# Altium footprint library Sierrathon.PcbLib: 12 footprints
Each footprint in its own frame and in the unit in brackets; x right, y up, seen from the top. Pads: shape width x height; smd on the part's side, far side on the other; paste and mask are expansions set on the pad; w line width, h text height; cw(c..) or ccw(c..) is an arc to the next point about the centre after c.
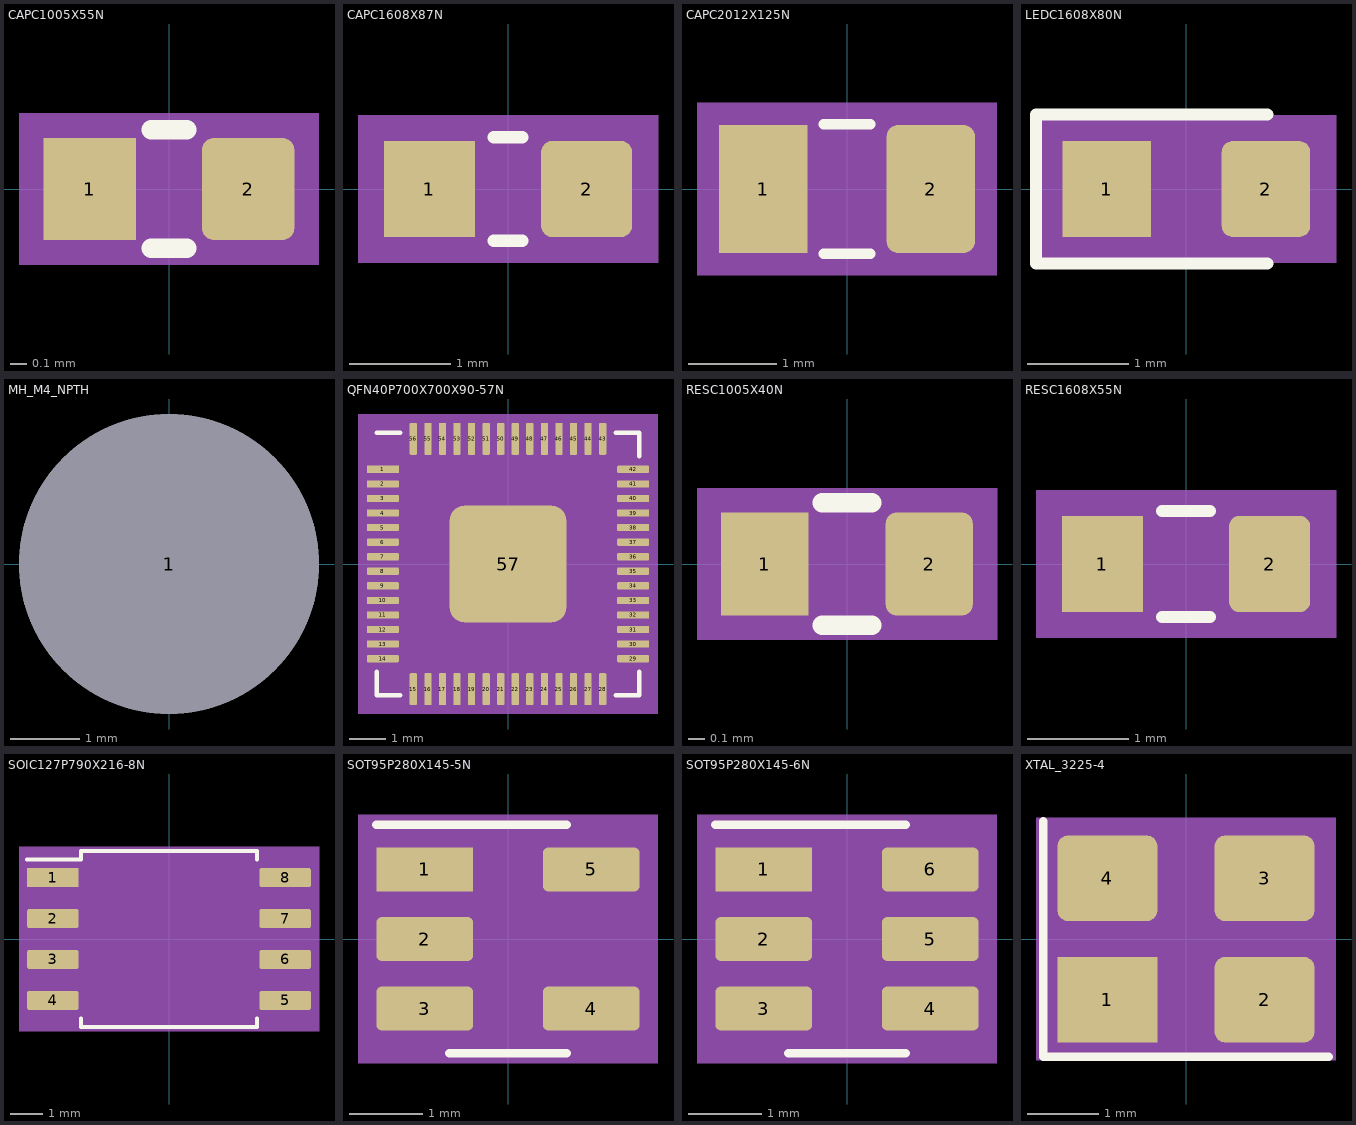
[diagram p0: the footprints below, top view; thin cyan lines are the x and y axes]

## CAPC1005X55N [mm] "Chip capacitor 0402 (1005 metric), IPC-7351B nominal"
pads (2):
  rect 0.56x0.62 smd: 1(-0.48,0)
  rrect25% 0.56x0.62 smd: 2(0.48,0)
Top Overlay:
  lines w0.12: -0.108,-0.36 0.108,-0.36 ; -0.108,0.36 0.108,0.36
  text ".Designator" at 0,0.91 h1
Top Assembly:
  lines w0.1: -0.5,-0.25 -0.5,0.25 0.5,0.25 0.5,-0.25 -0.5,-0.25
Top Courtyard:
  region: -0.91,-0.46 0.91,-0.46 0.91,0.46 -0.91,0.46

## CAPC1608X87N [mm] "Chip capacitor 0603 (1608 metric), IPC-7351B nominal"
pads (2):
  rect 0.9x0.95 smd: 1(-0.775,0)
  rrect25% 0.9x0.95 smd: 2(0.775,0)
Top Overlay:
  lines w0.12: -0.141,-0.51 0.141,-0.51 ; -0.141,0.51 0.141,0.51
  text ".Designator" at 0,1.075 h1
Top Assembly:
  lines w0.1: -0.8,-0.4 -0.8,0.4 0.8,0.4 0.8,-0.4 -0.8,-0.4
Top Courtyard:
  region: -1.48,-0.73 1.48,-0.73 1.48,0.73 -1.48,0.73

## CAPC2012X125N [mm] "Chip capacitor 0805 (2012 metric), IPC-7351B nominal"
pads (2):
  rect 1x1.45 smd: 1(-0.95,0)
  rrect25% 1x1.45 smd: 2(0.95,0)
Top Overlay:
  lines w0.12: -0.261,-0.735 0.261,-0.735 ; -0.261,0.735 0.261,0.735
  text ".Designator" at 0,1.325 h1
Top Assembly:
  lines w0.1: -1,-0.625 -1,0.625 1,0.625 1,-0.625 -1,-0.625
Top Courtyard:
  region: -1.7,-0.98 1.7,-0.98 1.7,0.98 -1.7,0.98

## LEDC1608X80N [mm] "Chip LED 0603 (1608 metric). Pad 1 = cathode"
pads (2):
  rect 0.875x0.95 smd: 1(-0.787,0)
  rrect25% 0.875x0.95 smd: 2(0.787,0)
Top Overlay:
  lines w0.12: 0.8,-0.735 -1.485,-0.735 -1.485,0.735 0.8,0.735
  text ".Designator" at 0,1.075 h1
Top Assembly:
  lines w0.1: -0.8,-0.4 -0.8,0.1 -0.5,0.4 0.8,0.4 0.8,-0.4 -0.8,-0.4
Top Courtyard:
  region: -1.48,-0.73 1.48,-0.73 1.48,0.73 -1.48,0.73

## MH_M4_NPTH [mm] "M4 mounting hole, 4.3 mm NPTH"
pads (1):
  round 4.3 hole 4.3 unplated: 1(0,0)
Top Overlay:
  text ".Designator" at 0,2.75 h1

## QFN40P700X700X90-57N [mm] "QFN-56 7x7 mm 0.4 mm pitch, EP 3.2 x 3.2 mm (RP2040)"
pads (57):
  rect 0.875x0.2 smd: 1(-3.437,2.6)
  rrect25% 0.875x0.2 smd: 2(-3.437,2.2) 3(-3.437,1.8) 4(-3.437,1.4) 5(-3.437,1) 6(-3.437,0.6) 7(-3.437,0.2) 8(-3.437,-0.2) 9(-3.437,-0.6) 10(-3.437,-1) 11(-3.437,-1.4) 12(-3.437,-1.8) 13(-3.437,-2.2) 14(-3.437,-2.6) 29(3.437,-2.6) 30(3.437,-2.2) 31(3.437,-1.8) 32(3.437,-1.4) 33(3.437,-1) 34(3.437,-0.6) 35(3.437,-0.2) 36(3.437,0.2) 37(3.437,0.6) 38(3.437,1) 39(3.437,1.4) 40(3.437,1.8) 41(3.437,2.2) 42(3.437,2.6)
  rrect25% 0.2x0.875 smd: 15(-2.6,-3.437) 16(-2.2,-3.437) 17(-1.8,-3.437) 18(-1.4,-3.437) 19(-1,-3.437) 20(-0.6,-3.437) 21(-0.2,-3.437) 22(0.2,-3.437) 23(0.6,-3.437) 24(1,-3.437) 25(1.4,-3.437) 26(1.8,-3.437) 27(2.2,-3.437) 28(2.6,-3.437) 43(2.6,3.437) 44(2.2,3.437) 45(1.8,3.437) 46(1.4,3.437) 47(1,3.437) 48(0.6,3.437) 49(0.2,3.437) 50(-0.2,3.437) 51(-0.6,3.437) 52(-1,3.437) 53(-1.4,3.437) 54(-1.8,3.437) 55(-2.2,3.437) 56(-2.6,3.437)
  rrect25% 3.2x3.2 smd: 57(0,0)
Top Overlay:
  lines w0.12: -3.61,-2.96 -3.61,-3.61 -2.96,-3.61 ; -3.61,3.61 -2.96,3.61 ; 2.96,-3.61 3.61,-3.61 3.61,-2.96 ; 2.96,3.61 3.61,3.61 3.61,2.96
  text ".Designator" at 0,4.475 h1
Top Assembly:
  lines w0.1: -3.5,-3.5 3.5,-3.5 3.5,3.5 -2.5,3.5 -3.5,2.5 -3.5,-3.5
Top Courtyard:
  region: -4.12,-4.12 4.12,-4.12 4.12,4.12 -4.12,4.12

## RESC1005X40N [mm] "Chip resistor 0402 (1005 metric), IPC-7351B nominal"
pads (2):
  rect 0.54x0.64 smd: 1(-0.51,0)
  rrect25% 0.54x0.64 smd: 2(0.51,0)
Top Overlay:
  lines w0.12: -0.154,-0.38 0.154,-0.38 ; -0.154,0.38 0.154,0.38
  text ".Designator" at 0,0.92 h1
Top Assembly:
  lines w0.1: -0.525,-0.27 -0.525,0.27 0.525,0.27 0.525,-0.27 -0.525,-0.27
Top Courtyard:
  region: -0.93,-0.47 0.93,-0.47 0.93,0.47 -0.93,0.47

## RESC1608X55N [mm] "Chip resistor 0603 (1608 metric), IPC-7351B nominal"
pads (2):
  rect 0.8x0.95 smd: 1(-0.825,0)
  rrect25% 0.8x0.95 smd: 2(0.825,0)
Top Overlay:
  lines w0.12: -0.237,-0.523 0.237,-0.523 ; -0.237,0.523 0.237,0.523
  text ".Designator" at 0,1.075 h1
Top Assembly:
  lines w0.1: -0.8,-0.413 -0.8,0.413 0.8,0.413 0.8,-0.413 -0.8,-0.413
Top Courtyard:
  region: -1.48,-0.73 1.48,-0.73 1.48,0.73 -1.48,0.73

## SOIC127P790X216-8N [mm] "SOIC-8 208 mil (5.23 x 5.23 mm body), 1.27 mm pitch"
pads (8):
  rect 1.6x0.6 smd: 1(-3.6,1.905)
  rrect25% 1.6x0.6 smd: 2(-3.6,0.635) 3(-3.6,-0.635) 4(-3.6,-1.905) 5(3.6,-1.905) 6(3.6,-0.635) 7(3.6,0.635) 8(3.6,1.905)
Top Overlay:
  lines w0.12: -4.4,2.465 -2.725,2.465 -2.725,2.725 0,2.725 2.725,2.725 2.725,2.465 ; -2.725,-2.465 -2.725,-2.725 0,-2.725 2.725,-2.725 2.725,-2.465
  text ".Designator" at 0,2.805 h1
Top Assembly:
  lines w0.1: -2.615,-2.615 2.615,-2.615 2.615,2.615 -1.615,2.615 -2.615,1.615 -2.615,-2.615
Top Courtyard:
  region: -4.65,-2.86 4.65,-2.86 4.65,2.86 -4.65,2.86

## SOT95P280X145-5N [mm] "SOT-23-5 (SOT-25), 0.95 mm pitch"
pads (5):
  rect 1.325x0.6 smd: 1(-1.138,0.95)
  rrect25% 1.325x0.6 smd: 2(-1.138,0) 3(-1.138,-0.95) 4(1.138,-0.95) 5(1.138,0.95)
Top Overlay:
  lines w0.12: -1.8,1.56 0,1.56 0.8,1.56 ; -0.8,-1.56 0,-1.56 0.8,-1.56
  text ".Designator" at 0,1.85 h1
Top Assembly:
  lines w0.1: -0.8,-1.45 0.8,-1.45 0.8,1.45 -0.4,1.45 -0.8,1.05 -0.8,-1.45
Top Courtyard:
  region: -2.05,-1.7 2.05,-1.7 2.05,1.7 -2.05,1.7

## SOT95P280X145-6N [mm] "SOT-23-6, 0.95 mm pitch"
pads (6):
  rect 1.325x0.6 smd: 1(-1.138,0.95)
  rrect25% 1.325x0.6 smd: 2(-1.138,0) 3(-1.138,-0.95) 4(1.138,-0.95) 5(1.138,0) 6(1.138,0.95)
Top Overlay:
  lines w0.12: -1.8,1.56 0,1.56 0.8,1.56 ; -0.8,-1.56 0,-1.56 0.8,-1.56
  text ".Designator" at 0,1.85 h1
Top Assembly:
  lines w0.1: -0.8,-1.45 0.8,-1.45 0.8,1.45 -0.4,1.45 -0.8,1.05 -0.8,-1.45
Top Courtyard:
  region: -2.05,-1.7 2.05,-1.7 2.05,1.7 -2.05,1.7

## XTAL_3225-4 [mm] "SMD crystal 3.2 x 2.5 mm, 4 pad (ABM8)"
pads (4):
  rect 1.4x1.2 smd: 1(-1.1,-0.85)
  rrect25% 1.4x1.2 smd: 2(1.1,-0.85) 3(1.1,0.85) 4(-1.1,0.85)
Top Overlay:
  lines w0.12: -2,1.65 -2,-1.65 2,-1.65
  text ".Designator" at 0,2.05 h1
Top Assembly:
  lines w0.1: -1.6,-0.25 -0.6,-1.25 ; -1.6,-1.25 -1.6,1.25 1.6,1.25 1.6,-1.25 -1.6,-1.25
Top Courtyard:
  region: -2.1,-1.7 2.1,-1.7 2.1,1.7 -2.1,1.7